# Altium integrated library 2N5551TF.IntLib: 1 symbol
Pins are listed as number, name and electrical type; pins without a type are passive.

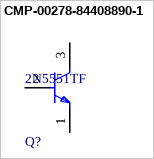
[diagram p0: symbol CMP-00278-84408890-1]

## CMP-00278-84408890-1
designator Q?, comment 2N5551TF
2N5551TF Small Signal Bipolar Transistor, 0.6A I(C), 160V V(BR)CEO, 1-Element, NPN, Silicon, TO-92; Manufacturer Lifecycle Status: ACTIVE; Max Power Dissipation: 625mW; Collector Base Voltage (VCBO): 180V; Emitter Base Voltage (VEBO): 6V; hFE Min: 80; Current Rating: 600mA; Number of Elements: 1; Element Configuration: Single; Max Junction Temperature (Tj): 150°C; Frequency: 300MHz; Transition Frequency: 100MHz; Collector Emitter Saturation Voltage: 200mV; Max Operating Temperature: 150°C; Number of Pins: 3; Polarity: NPN; Schedule B: 8541210080, 8541210080|8541210080|8541210080|8541210080|8541210080; Width: 4.19mm; Lead Free: Lead Free; Min Operating Temperature: -55°C; Contact Plating: Tin; Max Frequency: 300MHz; Height: 8.77mm; Voltage Rating (DC): 160V; Power Dissipation: 625mW; Radiation Hardening: No; Weight: 240mg; Max Breakdown Voltage: 160V; Gain Bandwidth Product: 100MHz; Case/Package: TO-92-3; Lifecycle Status: Production; Collector Emitter Voltage (VCEO): 160V; RoHS: Compliant; Length: 5.2mm; Mount: Through Hole; Max Collector Current: 600mA; Collector Emitter Breakdown Voltage: 160V
footprint FP-135AR-MFG
pins: 1 E, 2 B, 3 C